# Altium schematic symbol library male_haeder_2pin.SchLib: 1 symbol
Pins are listed as number, name and electrical type; pins without a type are passive.

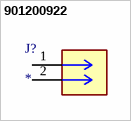
[diagram p0: symbol 901200922]

## 901200922
designator J?
MP: 901200922; Package: None; Price: None; Value: *; Availability: Unavailable
footprint CONN02_901200922_MOL
pins: 1, 2